# Altium footprint library Propia.PcbLib: 378 footprints (part 9 of 24)
Each footprint in its own frame and in the unit in brackets; x right, y up, seen from the top. Pads: shape width x height; smd on the part's side, far side on the other; paste and mask are expansions set on the pad; w line width, h text height; cw(c..) or ccw(c..) is an arc to the next point about the centre after c.
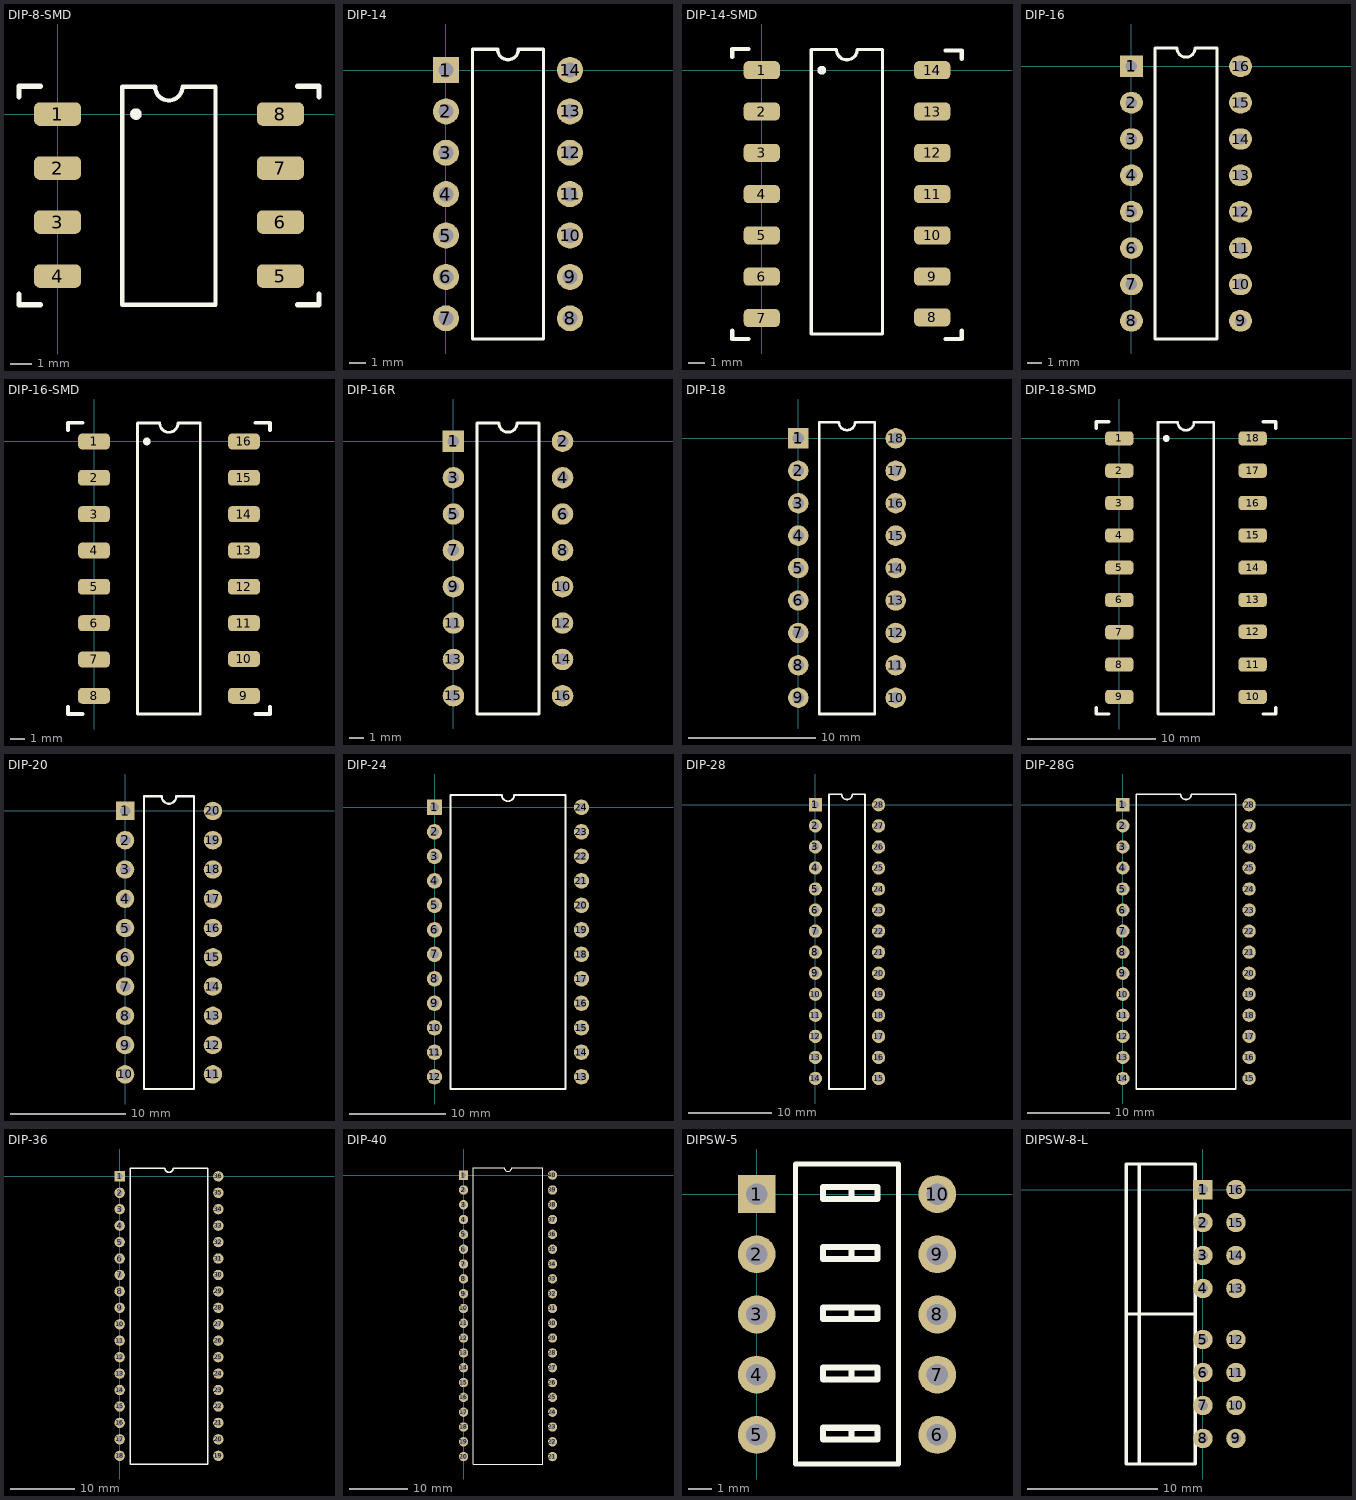
[diagram p8: the footprints below, top view; thin cyan lines are the x and y axes]

## DIP-8-SMD [mm]
pads (8):
  rrect50% 2.2x1.1 smd paste+0 mask+0.102: 1(0,0) 2(0,-2.52)
  rrect50% 2.2x1.1 smd: 3(0,-5.04) 4(0,-7.56) 5(10.4,-7.56) 6(10.4,-5.04) 7(10.4,-2.52) 8(10.4,0)
TopOverlay:
  circle w0.254: c3.659,0 r0.141
  lines w0.2: 3.015,-8.9 3.015,1.27 4.555,1.27 ccw(c5.19,1.27) 5.825,1.27 7.365,1.27 7.365,-8.9 3.015,-8.9
  lines w0.254: -1.8,-8.4 -1.8,-8.9 -0.8,-8.9 ; -1.8,0.8 -1.8,1.3 -0.8,1.3 ; 11.2,-8.9 12.2,-8.9 12.2,-8.4 ; 11.2,1.3 12.2,1.3 12.2,0.8

## DIP-14 [mm]
pads (14):
  rect 1.6x1.6 hole 0.9: 1(0,0)
  round 1.6 hole 0.9: 2(0,-2.54) 3(0,-5.08) 4(0,-7.62) 5(0,-10.16) 6(0,-12.7) 7(0,-15.24) 8(7.62,-15.24) 9(7.62,-12.7) 10(7.62,-10.16) 11(7.62,-7.62) 12(7.62,-5.08) 13(7.62,-2.54) 14(7.62,0)
TopOverlay:
  lines w0.2: 1.635,-16.51 1.635,1.27 3.175,1.27 ccw(c3.81,1.27) 4.445,1.27 5.985,1.27 5.985,-16.51 1.635,-16.51

## DIP-14-SMD [mm]
pads (14):
  rrect50% 2.2x1.1 smd paste+0 mask+0.102: 1(0,0) 2(0,-2.52)
  rrect50% 2.2x1.1 smd: 3(0,-5.04) 4(0,-7.56) 5(0,-10.08) 6(0,-12.6) 7(0,-15.12) 8(10.4,-15.08) 9(10.4,-12.6) 10(10.4,-10.08) 11(10.4,-7.56) 12(10.4,-5.04) 13(10.4,-2.52) 14(10.4,0)
TopOverlay:
  circle w0.254: c3.659,0 r0.141
  lines w0.2: 3.015,-16.1 3.015,1.27 4.555,1.27 ccw(c5.19,1.27) 5.825,1.27 7.365,1.27 7.365,-16.1 3.015,-16.1
  lines w0.254: -1.8,-15.9 -1.8,-16.4 -0.8,-16.4 ; -1.8,0.8 -1.8,1.3 -0.8,1.3 ; 11.2,-16.4 12.2,-16.4 12.2,-15.9 ; 11.2,1.2 12.2,1.2 12.2,0.7

## DIP-16 [mm]
pads (16):
  rect 1.6x1.5 hole 0.8: 1(0,0)
  oval 1.6x1.5 hole 0.8: 2(0,-2.54) 3(0,-5.08) 4(0,-7.62) 5(0,-10.16) 6(0,-12.7) 7(0,-15.24) 8(0,-17.78) 9(7.62,-17.78) 10(7.62,-15.24) 11(7.62,-12.7) 12(7.62,-10.16) 13(7.62,-7.62) 14(7.62,-5.08) 15(7.62,-2.54) 16(7.62,0)
TopOverlay:
  lines w0.2: 1.635,-19.05 5.985,-19.05 5.985,1.27 4.445,1.27 cw(c3.81,1.27) 3.175,1.27 1.635,1.27 1.635,-19.05

## DIP-16-SMD [mm]
pads (16):
  rrect50% 2.2x1.1 smd paste+0 mask+0.102: 1(0,0) 2(0,-2.52) 8(0,-17.64) 9(10.4,-17.64)
  rrect50% 2.2x1.1 smd: 3(0,-5.04) 4(0,-7.56) 5(0,-10.08) 6(0,-12.6) 7(0,-15.12) 10(10.4,-15.08) 11(10.4,-12.6) 12(10.4,-10.08) 13(10.4,-7.56) 14(10.4,-5.04) 15(10.4,-2.52) 16(10.4,0)
TopOverlay:
  circle w0.254: c3.659,0 r0.141
  lines w0.2: 3.015,-18.9 7.365,-18.9 7.365,1.27 5.825,1.27 cw(c5.19,1.27) 4.555,1.27 3.015,1.27 3.015,-18.9
  lines w0.254: -1.8,-18.4 -1.8,-18.9 -0.8,-18.9 ; -1.8,0.8 -1.8,1.3 -0.8,1.3 ; 11.2,-18.9 12.2,-18.9 12.2,-18.4 ; 11.2,1.3 12.2,1.3 12.2,0.8

## DIP-16R [mm]
pads (16):
  rect 1.5x1.5 hole 0.8: 1(0,0)
  round 1.5 hole 0.8: 2(7.62,0) 3(0,-2.54) 4(7.62,-2.54) 5(0,-5.08) 6(7.62,-5.08) 7(0,-7.62) 8(7.62,-7.62) 9(0,-10.16) 10(7.62,-10.16) 11(0,-12.7) 12(7.62,-12.7) 13(0,-15.24) 14(7.62,-15.24) 15(0,-17.78) 16(7.62,-17.78)
TopOverlay:
  lines w0.2: 1.635,-19.05 5.985,-19.05 5.985,1.27 4.445,1.27 cw(c3.81,1.27) 3.175,1.27 1.635,1.27 1.635,-19.05

## DIP-18 [mm]
pads (18):
  rect 1.6x1.6 hole 0.9: 1(0,0)
  round 1.6 hole 0.9: 2(0,-2.54) 3(0,-5.08) 4(0,-7.62) 5(0,-10.16) 6(0,-12.7) 7(0,-15.24) 8(0,-17.78) 9(0,-20.32) 10(7.62,-20.32) 11(7.62,-17.78) 12(7.62,-15.24) 13(7.62,-12.7) 14(7.62,-10.16) 15(7.62,-7.62) 16(7.62,-5.08) 17(7.62,-2.54) 18(7.62,0)
TopOverlay:
  lines w0.2: 1.635,-21.59 1.635,1.27 3.175,1.27 ccw(c3.81,1.27) 4.445,1.27 5.985,1.27 5.985,-21.59 1.635,-21.59

## DIP-18-SMD [mm]
pads (18):
  rrect50% 2.2x1.1 smd paste+0 mask+0.102: 1(0,0) 2(0,-2.52) 8(0,-17.64) 9(0,-20.16) 10(10.4,-20.16) 11(10.4,-17.64)
  rrect50% 2.2x1.1 smd: 3(0,-5.04) 4(0,-7.56) 5(0,-10.08) 6(0,-12.6) 7(0,-15.12) 12(10.4,-15.08) 13(10.4,-12.6) 14(10.4,-10.08) 15(10.4,-7.56) 16(10.4,-5.04) 17(10.4,-2.52) 18(10.4,0)
TopOverlay:
  circle w0.254: c3.659,0 r0.141
  lines w0.2: 3.015,-21.5 7.365,-21.5 7.365,1.27 5.825,1.27 cw(c5.19,1.27) 4.555,1.27 3.015,1.27 3.015,-21.5
  lines w0.254: -1.8,-21 -1.8,-21.5 -0.8,-21.5 ; -1.8,0.8 -1.8,1.3 -0.8,1.3 ; 11.2,-21.5 12.2,-21.5 12.2,-21 ; 11.2,1.3 12.2,1.3 12.2,0.8

## DIP-20 [mm]
pads (20):
  rect 1.6x1.6 hole 0.9: 1(0,0)
  round 1.6 hole 0.9: 2(0,-2.54) 3(0,-5.08) 4(0,-7.62) 5(0,-10.16) 6(0,-12.7) 7(0,-15.24) 8(0,-17.78) 9(0,-20.32) 10(0,-22.86) 11(7.62,-22.86) 12(7.62,-20.32) 13(7.62,-17.78) 14(7.62,-15.24) 15(7.62,-12.7) 16(7.62,-10.16) 17(7.62,-7.62) 18(7.62,-5.08) 19(7.62,-2.54) 20(7.62,0)
TopOverlay:
  lines w0.2: 1.635,-24.13 5.985,-24.13 5.985,1.27 4.445,1.27 cw(c3.81,1.27) 3.175,1.27 1.635,1.27 1.635,-24.13

## DIP-24 [mm]
pads (24):
  rect 1.6x1.6 hole 0.9: 1(0,0)
  round 1.6 hole 0.9: 2(0,-2.54) 3(0,-5.08) 4(0,-7.62) 5(0,-10.16) 6(0,-12.7) 7(0,-15.24) 8(0,-17.78) 9(0,-20.32) 10(0,-22.86) 11(0,-25.4) 12(0,-27.94) 13(15.24,-27.94) 14(15.24,-25.4) 15(15.24,-22.86) 16(15.24,-20.32) 17(15.24,-17.78) 18(15.24,-15.24) 19(15.24,-12.7) 20(15.24,-10.16) 21(15.24,-7.62) 22(15.24,-5.08) 23(15.24,-2.54) 24(15.24,0)
TopOverlay:
  lines w0.2: 1.635,-29.21 1.635,1.27 6.985,1.27 ccw(c7.62,1.27) 8.255,1.27 13.605,1.27 13.605,-29.21 1.635,-29.21

## DIP-28 [mm]
pads (28):
  rect 1.6x1.6 hole 0.9: 1(0,0)
  round 1.6 hole 0.9: 2(0,-2.54) 3(0,-5.08) 4(0,-7.62) 5(0,-10.16) 6(0,-12.7) 7(0,-15.24) 8(0,-17.78) 9(0,-20.32) 10(0,-22.86) 11(0,-25.4) 12(0,-27.94) 13(0,-30.48) 14(0,-33.02) 15(7.62,-33.02) 16(7.62,-30.48) 17(7.62,-27.94) 18(7.62,-25.4) 19(7.62,-22.86) 20(7.62,-20.32) 21(7.62,-17.78) 22(7.62,-15.24) 23(7.62,-12.7) 24(7.62,-10.16) 25(7.62,-7.62) 26(7.62,-5.08) 27(7.62,-2.54) 28(7.62,0)
TopOverlay:
  lines w0.2: 1.635,-34.29 5.985,-34.29 5.985,1.27 4.445,1.27 cw(c3.81,1.27) 3.175,1.27 1.635,1.27 1.635,-34.29

## DIP-28G [mm]
pads (28):
  rect 1.6x1.6 hole 0.9: 1(0,0)
  round 1.6 hole 0.9: 2(0,-2.54) 3(0,-5.08) 4(0,-7.62) 5(0,-10.16) 6(0,-12.7) 7(0,-15.24) 8(0,-17.78) 9(0,-20.32) 10(0,-22.86) 11(0,-25.4) 12(0,-27.94) 13(0,-30.48) 14(0,-33.02) 15(15.24,-33.02) 16(15.24,-30.48) 17(15.24,-27.94) 18(15.24,-25.4) 19(15.24,-22.86) 20(15.24,-20.32) 21(15.24,-17.78) 22(15.24,-15.24) 23(15.24,-12.7) 24(15.24,-10.16) 25(15.24,-7.62) 26(15.24,-5.08) 27(15.24,-2.54) 28(15.24,0)
TopOverlay:
  lines w0.2: 1.635,-34.29 1.635,1.27 6.985,1.27 ccw(c7.62,1.27) 8.255,1.27 13.605,1.27 13.605,-34.29 1.635,-34.29

## DIP-36 [mm]
pads (36):
  rect 1.6x1.6 hole 0.9: 1(0,0)
  round 1.6 hole 0.9: 2(0,-2.54) 3(0,-5.08) 4(0,-7.62) 5(0,-10.16) 6(0,-12.7) 7(0,-15.24) 8(0,-17.78) 9(0,-20.32) 10(0,-22.86) 11(0,-25.4) 12(0,-27.94) 13(0,-30.48) 14(0,-33.02) 15(0,-35.56) 16(0,-38.1) 17(0,-40.64) 18(0,-43.18) 19(15.24,-43.18) 20(15.24,-40.64) 21(15.24,-38.1) 22(15.24,-35.56) 23(15.24,-33.02) 24(15.24,-30.48) 25(15.24,-27.94) 26(15.24,-25.4) 27(15.24,-22.86) 28(15.24,-20.32) 29(15.24,-17.78) 30(15.24,-15.24) 31(15.24,-12.7) 32(15.24,-10.16) 33(15.24,-7.62) 34(15.24,-5.08) 35(15.24,-2.54) 36(15.24,0)
TopOverlay:
  lines w0.2: 1.635,-44.45 1.635,1.27 6.985,1.27 ccw(c7.62,1.27) 8.255,1.27 13.605,1.27 13.605,-44.45 1.635,-44.45

## DIP-40 [mm]
pads (40):
  rect 1.6x1.6 hole 0.9: 1(0,0)
  round 1.6 hole 0.9: 2(0,-2.54) 3(0,-5.08) 4(0,-7.62) 5(0,-10.16) 6(0,-12.7) 7(0,-15.24) 8(0,-17.78) 9(0,-20.32) 10(0,-22.86) 11(0,-25.4) 12(0,-27.94) 13(0,-30.48) 14(0,-33.02) 15(0,-35.56) 16(0,-38.1) 17(0,-40.64) 18(0,-43.18) 19(0,-45.72) 20(0,-48.26) 21(15.24,-48.26) 22(15.24,-45.72) 23(15.24,-43.18) 24(15.24,-40.64) 25(15.24,-38.1) 26(15.24,-35.56) 27(15.24,-33.02) 28(15.24,-30.48) 29(15.24,-27.94) 30(15.24,-25.4) 31(15.24,-22.86) 32(15.24,-20.32) 33(15.24,-17.78) 34(15.24,-15.24) 35(15.24,-12.7) 36(15.24,-10.16) 37(15.24,-7.62) 38(15.24,-5.08) 39(15.24,-2.54) 40(15.24,0)
TopOverlay:
  lines w0.2: 1.635,-49.53 1.635,1.27 6.985,1.27 ccw(c7.62,1.27) 8.255,1.27 13.605,1.27 13.605,-49.53 1.635,-49.53

## DIPSW-5 [mm]
pads (10):
  rect 1.6x1.6 hole 0.9: 1(0,0)
  round 1.6 hole 0.9: 2(0,-2.54) 3(0,-5.08) 4(0,-7.62) 5(0,-10.16) 6(7.62,-10.16) 7(7.62,-7.62) 8(7.62,-5.08) 9(7.62,-2.54) 10(7.62,0)
TopOverlay:
  lines w0.2: 1.635,-11.39 1.635,1.27 5.985,1.27 5.985,-11.39 1.635,-11.39
  lines w0.254: 4,-10.26 4,-9.86 ; 4,-7.72 4,-7.32 ; 4,-5.28 4,-4.78 ; 4,-2.74 4,-2.24 ; 4,-0.2 4,0.3 ; 2.8,-10.36 2.8,-9.86 5.1,-9.86 5.1,-10.36 2.8,-10.36 ; 2.8,-7.82 2.8,-7.32 5.1,-7.32 5.1,-7.82 2.8,-7.82 ; 2.8,-5.28 2.8,-4.78 5.1,-4.78 5.1,-5.28 2.8,-5.28 ; 2.8,-2.74 2.8,-2.24 5.1,-2.24 5.1,-2.74 2.8,-2.74 ; 2.8,-0.2 2.8,0.3 5.1,0.3 5.1,-0.2 2.8,-0.2

## DIPSW-8-L [mm]
pads (16):
  rect 1.5x1.5 hole 0.8: 1(0,0)
  round 1.5 hole 0.8: 2(0,-2.54) 3(0,-5.08) 4(0,-7.62) 5(0,-11.55) 6(0,-14.09) 7(0,-16.63) 8(0,-19.17) 9(2.54,-19.17) 10(2.54,-16.63) 11(2.54,-14.09) 12(2.54,-11.55) 13(2.54,-7.62) 14(2.54,-5.08) 15(2.54,-2.54) 16(2.54,0)
TopOverlay:
  lines w0.254: -4.9,-21.135 -4.9,1.965 ; -5.9,-9.585 -5.9,-21.135 -0.6,-21.135 -0.6,-9.585 ; -5.9,-9.585 -5.9,1.965 -0.6,1.965 -0.6,-9.585 ; -5.9,-9.585 -0.6,-9.585